# Altium schematic symbol library BQ25616JRTWR.SchLib: 1 symbol
Pins are listed as number, name and electrical type; pins without a type are passive.

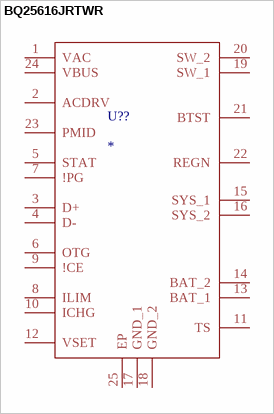
[diagram p0: symbol BQ25616JRTWR]

## BQ25616JRTWR
designator U??
footprint QFN50P400X400X80
pins: 1 VAC, 2 ACDRV, 3 D+, 4 D-, 5 STAT, 6 OTG, 7 !PG, 8 ILIM, 9 !CE, 10 ICHG, 11 TS, 12 VSET, 13 BAT_1, 14 BAT_2, 15 SYS_1, 16 SYS_2, 17 GND_1, 18 GND_2, 19 SW_1, 20 SW_2, 21 BTST, 22 REGN, 23 PMID, 24 VBUS, 25 EP